# Altium footprint library CRCW25121K50FKEGHP.PcbLib: 3 footprints
Each footprint in its own frame and in the unit in brackets; x right, y up, seen from the top. Pads: shape width x height; smd on the part's side, far side on the other; paste and mask are expansions set on the pad; w line width, h text height; cw(c..) or ccw(c..) is an arc to the next point about the centre after c.
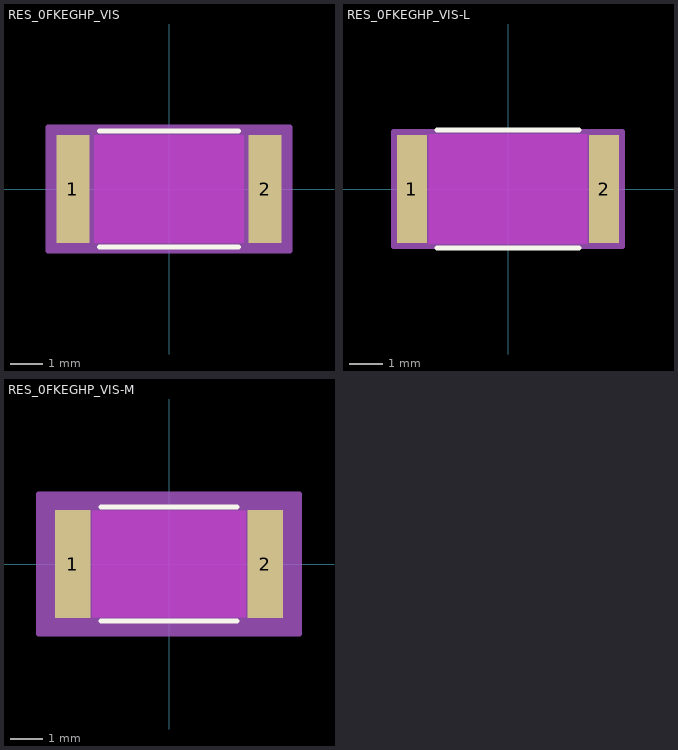
[diagram p0: the footprints below, top view; thin cyan lines are the x and y axes]

## RES_0FKEGHP_VIS [mil]
pads (2):
  rect 39.87x130 smd paste+0 mask+0: 1(-115.94,0) 2(115.94,0)
Top Layer keep-out:
  region: -90,-63 -90,63 90,63 90,-63
Top Overlay:
  lines w6: -83.89,-70 83.89,-70 ; -83.89,70 83.89,70
  text ".Designator" at -137.5,-25 h50
Keep-Out Layer:
  region: -90,-65 -90,65 90,65 90,-65
Mechanical 13:
  lines w1: -128,-65 -128,65 ; -128,-65 128,-65 ; -128,-65 -96,-65 -96,65 -128,65 ; -128,-65 -128,65 ; -128,65 128,65 ; 128,-65 128,65 ; 128,-65 128,65 ; 128,-65 96,-65 96,65 128,65
  text ".Designator" at -137.5,-25 h50
Mechanical 15:
  region: 145.87,-75 -145.87,-75 -145.87,75 145.87,75
  lines w6: -145.87,-75 145.87,-75 145.87,75 -145.87,75 -145.87,-75
3D body "RES_0FKEGHP_VIS.step": height 27.99, standoff 0, extent -127.99,-65 127.99,65

## RES_0FKEGHP_VIS-L [mil]
pads (2):
  rect 35.94x128.03 smd paste+0 mask+0: 1(-113.97,0) 2(113.97,0)
Top Layer keep-out:
  region: -94,-63 -94,63 94,63 94,-63
Top Overlay:
  lines w6: -84.35,-70 84.35,-70 ; -84.35,70 84.35,70
  text ".Designator" at -137.5,-25 h50
Keep-Out Layer:
  region: -94,-65 -94,65 94,65 94,-65
Mechanical 13:
  lines w1: -128,-65 -128,65 ; -128,-65 -96,-65 -96,65 -128,65 ; -128,-65 128,-65 ; -128,-65 -128,65 ; -128,65 128,65 ; 128,-65 96,-65 96,65 128,65 ; 128,-65 128,65 ; 128,-65 128,65
  text ".Designator" at -137.5,-25 h50
Mechanical 15:
  region: 135.94,-68.02 -135.94,-68.02 -135.94,68.02 135.94,68.02
  lines w6: -135.94,-68.02 -135.94,68.02 135.94,68.02 135.94,-68.02 -135.94,-68.02
3D body "RES_0FKEGHP_VIS.step": height 27.99, standoff 0, extent -127.99,-65 127.99,65

## RES_0FKEGHP_VIS-M [mil]
pads (2):
  rect 43.81x131.97 smd paste+0 mask+0: 1(-117.91,0) 2(117.91,0)
Top Layer keep-out:
  region: -94,-63 -94,63 94,63 94,-63
Top Overlay:
  lines w6: -83.53,-70 83.53,-70 ; -83.53,70 83.53,70
  text ".Designator" at -137.5,-25 h50
Keep-Out Layer:
  region: -94,-65 -94,65 94,65 94,-65
Mechanical 13:
  lines w1: -128,-65 -128,65 ; -128,-65 -96,-65 -96,65 -128,65 ; -128,-65 128,-65 ; -128,-65 -128,65 ; -128,65 128,65 ; 128,-65 96,-65 96,65 128,65 ; 128,-65 128,65 ; 128,-65 128,65
  text ".Designator" at -137.5,-25 h50
Mechanical 15:
  region: 159.81,-85.98 -159.81,-85.98 -159.81,85.98 159.81,85.98
  lines w6: -159.81,-85.98 -159.81,85.98 159.81,85.98 159.81,-85.98 -159.81,-85.98
3D body "RES_0FKEGHP_VIS.step": height 27.99, standoff 0, extent -127.99,-65 127.99,65